# Altium footprint library Water Tank Telemeter.PcbLib: 45 footprints (part 3 of 3)
Each footprint in its own frame and in the unit in brackets; x right, y up, seen from the top. Pads: shape width x height; smd on the part's side, far side on the other; paste and mask are expansions set on the pad; w line width, h text height; cw(c..) or ccw(c..) is an arc to the next point about the centre after c.
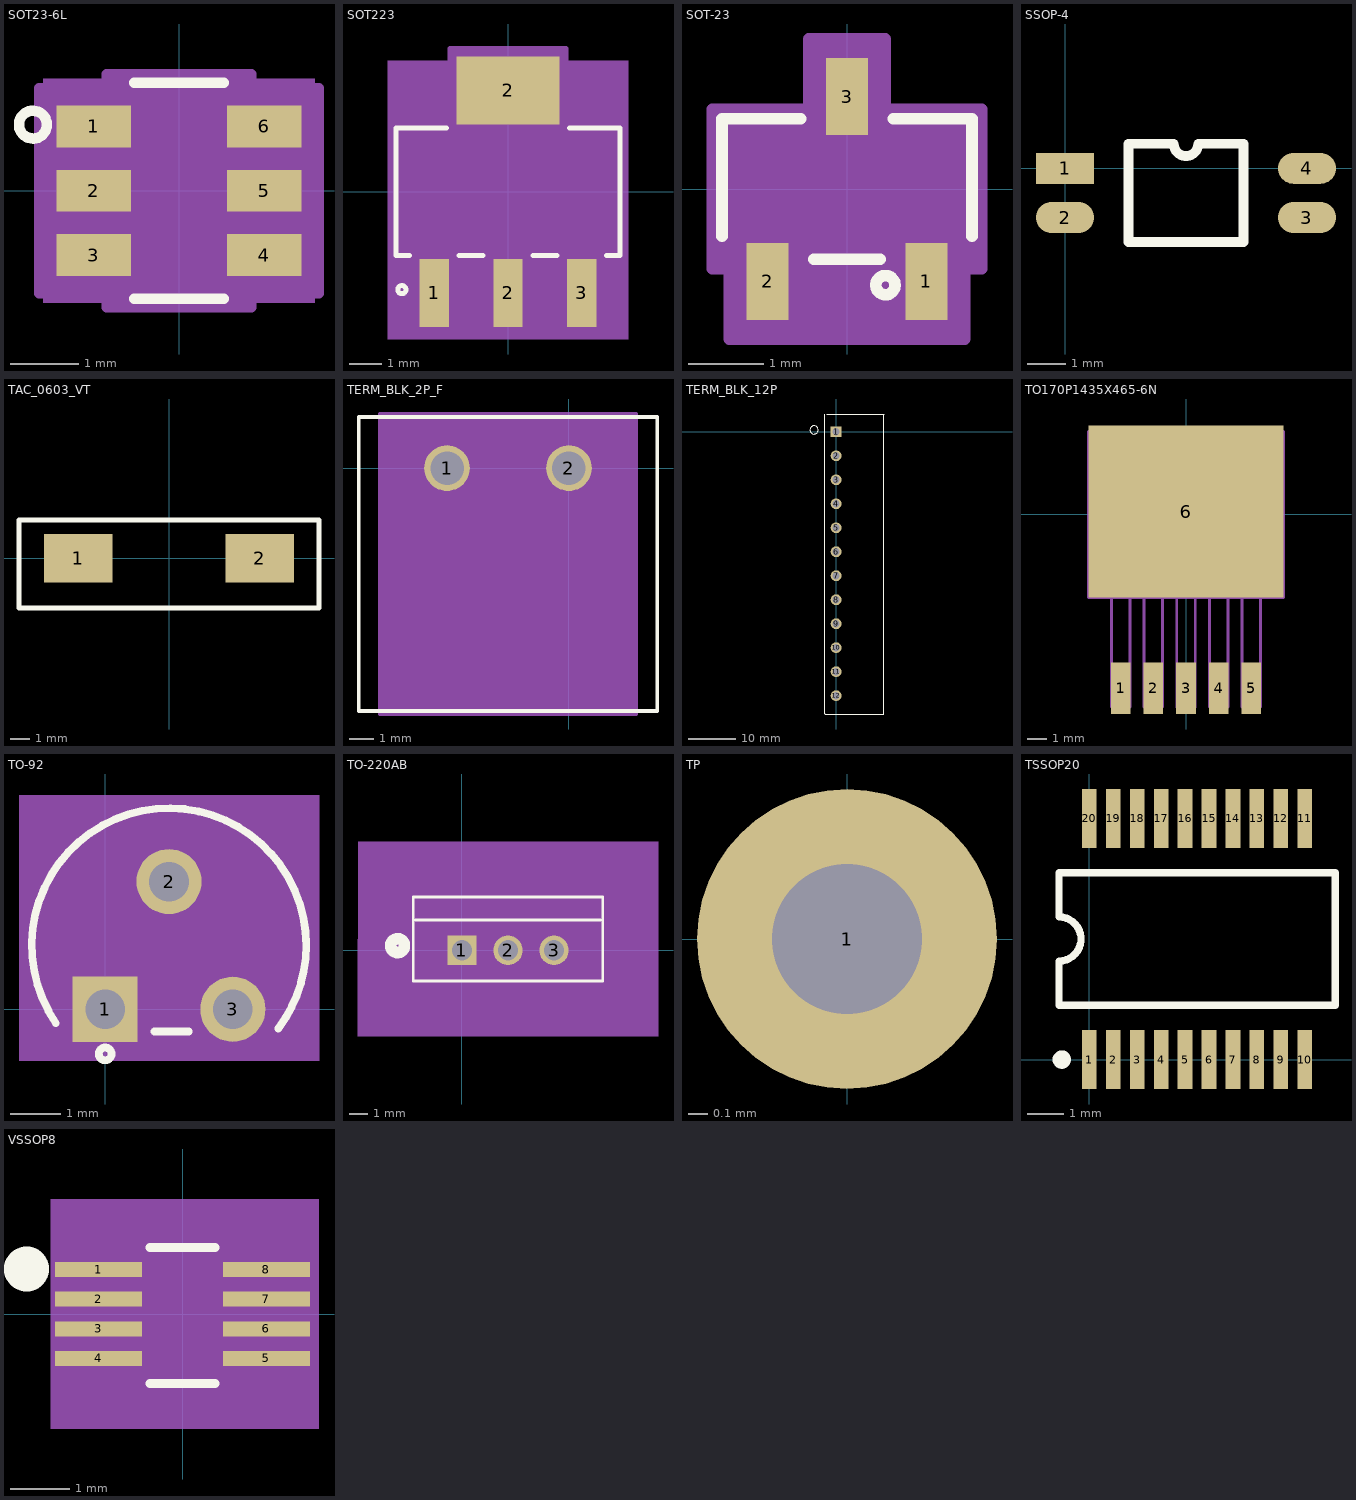
[diagram p2: the footprints below, top view; thin cyan lines are the x and y axes]

## SOT23-6L [mil]
pads (6):
  rect 43x24 smd paste+0 mask+0: 1(-49,37) 2(-49,0) 3(-49,-37) 4(49,-37) 5(49,0) 6(49,37)
Top Overlay:
  circle w6: c-84,38 r8
  lines w6: -25.88,-62 25.88,-62 ; -25.88,62 25.88,62
Mechanical 5:
  region: 78,-64.5 -78,-64.5 -78,64.5 78,64.5
Mechanical 13:
  circle w0: c-21.5,37 r3
  lines w0: -12,57 ccw(c0,57) 12,57
  lines w1: -31.5,-57 31.5,-57 31.5,57 -31.5,57 -31.5,-57
Mechanical 15:
  region: -41.5,-59 -80.5,-59 -80.5,59 -41.5,59 -41.5,67 41.5,67 41.5,59 80.5,59 80.5,-59 41.5,-59 41.5,-67 -41.5,-67
  lines w6: -80.5,-59 -80.5,59 -41.5,59 -41.5,67 41.5,67 41.5,59 80.5,59 80.5,-59 41.5,-59 41.5,-67 -41.5,-67 -41.5,-59 -80.5,-59
3D body "SOT-6_S-M.step": height 39.09, standoff 0, extent -52,-57.01 58,57.01
3D body: height 10, standoff 0, extent 0,0 10,10

## SOT223 [mil]
pads (4):
  rect 36x83 smd paste+0 mask+0: 1(-90.55,-124) 2(0,-124) 3(90.55,-124)
  rect 126x83 smd paste+0 mask+0: 2(0,124)
Top Overlay:
  circle w6: c-130,-120 r5
  lines w6: -120.85,-78 -137,-78 -137,78 -75.3,78 ; -60.25,-78 -30.3,-78 ; 30.3,-78 60.25,-78 ; 75.3,78 137,78 137,-78 120.85,-78
Mechanical 5:
  region: -147,160.5 147,160.5 147,-180.5 -147,-180.5
Mechanical 13:
  circle w0: c-122,-63 r5
  lines w1: -132,-73 -132,73 132,73 132,-73 -132,-73 ; -106.55,-143.5 -74.55,-143.5 -74.55,-73 -106.55,-73 -106.55,-143.5 ; -61,73 -61,143.5 61,143.5 61,73 -61,73 ; -16,-143.5 16,-143.5 16,-73 -16,-73 -16,-143.5 ; 74.55,-143.5 106.55,-143.5 106.55,-73 74.55,-73 74.55,-143.5
Mechanical 15:
  region: -142,-83 -142,83 -71,83 -71,175.5 71,175.5 71,83 142,83 142,-83 116.55,-83 116.55,-175.5 -116.55,-175.5 -116.55,-83
  lines w6: -142,-83 -116.55,-83 -116.55,-175.5 116.55,-175.5 116.55,-83 142,-83 142,83 71,83 71,175.5 -71,175.5 -71,83 -142,83 -142,-83
3D body "CircuitWorks-SOT-223.STEP": height 65.43, standoff -0.71, extent -127.95,-132.01 127.95,142
3D body: height 10, standoff 0, extent 0,0 10,10

## SOT-23 [mil]
pads (3):
  rect 22x40 smd paste+0 mask+0: 1(41.34,-48) 2(-41.34,-48) 3(0,48)
Top Overlay:
  circle w6: c20,-50 r5
  lines w6: -65,-24.64 -65,36.5 -24.1,36.5 ; -17.24,-36.5 17.24,-36.5 ; 24.1,36.5 65,36.5 65,-24.64
Mechanical 13:
  circle w0: c-50,-21.5 r5
  lines w1: -60,-31.5 60,-31.5 60,31.5 -60,31.5 -60,-31.5 ; -51.34,-54 -51.34,-31.5 -31.34,-31.5 -31.34,-54 -51.34,-54 ; -10,31.5 10,31.5 10,54 -10,54 -10,31.5 ; 31.34,-54 31.34,-31.5 51.34,-31.5 51.34,-54 31.34,-54
Mechanical 15:
  region: -70,-41.5 -70,41.5 -20,41.5 -20,78 20,78 20,41.5 70,41.5 70,-41.5 61.34,-41.5 61.34,-78 -61.34,-78 -61.34,-41.5
  region: 60,-31.5 -60,-31.5 -60,31.5 60,31.5
  lines w6: -70,-41.5 -70,41.5 -20,41.5 -20,78 20,78 20,41.5 70,41.5 70,-41.5 61.34,-41.5 61.34,-78 -61.34,-78 -61.34,-41.5 -70,-41.5
3D body "SOT-23_J.stp": height 39.53, standoff -0.83, extent -58.07,-48.91 58.07,48.91
3D body: height 10, standoff 0, extent 0,0 10,10

## SSOP-4 [mm]
pads (4):
  rect 1.5x0.8 smd: 1(0,0)
  oval 1.5x0.8 smd: 2(0,-1.27) 3(6.25,-1.27) 4(6.25,0)
Top Overlay:
  lines w0.254: 1.639,-1.905 4.611,-1.905 4.611,0.635 3.443,0.635 cw(c3.125,0.635) 2.808,0.635 1.639,0.635 1.639,-1.905
3D body "User Library-SSOP-4.STEP": height 2.02, standoff 0, extent -0.452,-2.032 6.548,0.668

## TAC_0603_VT [mm]
pads (2):
  rect 3.5x2.5 smd: 1(-4.625,0) 2(4.625,0)
Top Overlay:
  lines w0.254: -7.665,-2.54 7.665,-2.54 7.665,1.956 -7.665,1.956 -7.665,0 -7.665,-2.54
3D body "PTS636SK43SMTRLFS.stp": height 4.3, standoff -0.03, extent -4.325,-1.75 4.275,1.75

## TERM_BLK_2P_F [mil]
pads (2):
  round 75 hole 55 mask+0: 1(-200,0) 2(0,0)
Top Overlay:
  lines w6: -345,-398.26 145,-398.26 145,83.74 -345,83.74 -345,-398.26
Mechanical 13:
  lines w1: -300,-393.26 100,-393.26 100,78.74 -300,78.74 -300,-393.26
Mechanical 15:
  region: 110,88.74 -310,88.74 -310,-403.26 110,-403.26
  lines w6: -310,-403.26 -310,88.74 110,88.74 110,-403.26 -310,-403.26
3D body: height 10, standoff 0, extent 0,0 10,10
3D body "395326002.stp": height 330, standoff -150, extent -339,-385 140,85

## TERM_BLK_12P [mil]
pads (12):
  rect 90x90 hole 60: 1(0,0)
  round 90 hole 60: 2(0,-199.28) 3(0,-398.55) 4(0,-597.82) 5(0,-797.09) 6(0,-996.37) 7(0,-1195.64) 8(0,-1394.91) 9(0,-1594.18) 10(0,-1793.45) 11(0,-1992.73) 12(0,-2192)
Top Overlay:
  circle w10: c-183,16 r34.71
  lines w6: -96,145 -96,-2340 -92,-2344 396,-2344 396,148 399,145 -78,145
3D body "395321012.stp": height 330, standoff -150, extent -81,-2333.5 389,145.5

## TO170P1435X465-6N [mil]
pads (6):
  rect 40x106 smd: 1(-134,-356) 2(-67,-356) 3(0,-356) 4(67,-356) 5(134,-356)
  rect 400x352 smd: 6(0,6)
Mechanical 13:
  lines w6: -200,-170 -200,170 ; -200,-170 200,-170 ; -200,-170 -200,170 ; -200,-170 200,-170 ; -200,170 200,170 ; -200,170 200,170 ; -153,-395 -115,-395 ; -153,-395 -153,-170 ; -153,-395 -115,-395 ; -153,-395 -153,-170 ; -153,-170 -115,-170 ; -153,-170 -115,-170 ; -115,-395 -115,-170 ; -115,-395 -115,-170 ; -86,-395 -48,-395 ; -86,-395 -86,-170 ; -86,-395 -48,-395 ; -86,-395 -86,-170 ; -86,-170 -48,-170 ; -86,-170 -48,-170 ; -48,-395 -48,-170 ; -48,-395 -48,-170 ; -19,-395 19,-395 ; -19,-395 -19,-170 ; -19,-395 19,-395 ; -19,-395 -19,-170 ; -19,-170 19,-170 ; -19,-170 19,-170 ; 19,-395 19,-170 ; 19,-395 19,-170 ; 48,-395 86,-395 ; 48,-395 48,-170 ; 48,-395 86,-395 ; 48,-395 48,-170 ; 48,-170 86,-170 ; 48,-170 86,-170 ; 86,-395 86,-170 ; 86,-395 86,-170 ; 115,-395 153,-395 ; 115,-395 115,-170 ; 115,-395 153,-395 ; 115,-395 115,-170 ; 115,-170 153,-170 ; 115,-170 153,-170 ; 153,-395 153,-170 ; 153,-395 153,-170 ; 200,-170 200,170 ; 200,-170 200,170
3D body "LM2596SX-12--3DModel-STEP-56544.STEP": height 184, standoff -5, extent -199.99,-355 200.01,210

## TO-92 [mil]
pads (3):
  rect 51x51 hole 31 mask+0: 1(0,0)
  round 51 hole 31 mask+0: 2(50,100) 3(100,0)
Top Overlay:
  circle w6: c0,-35 r5
  lines w6: -38.6,-10.88 cw(c50,50) 157.5,50 cw(c50,50) 135.49,-15.17 ; 38.6,-17.5 65.59,-17.5
Mechanical 5:
  region: -67.5,167.5 167.5,167.5 167.5,-40.5 -67.5,-40.5
Mechanical 13:
  circle w0: c-42.5,0 r5
  lines w0: -31.24,-12.5 cw(c50,50) 131.24,-12.5
  lines w1: -31.24,-12.5 131.24,-12.5
  lines w6: -10,0 10,0 ; 0,-10 0,10
Mechanical 15:
  region: 162.5,-35.5 -62.5,-35.5 -62.5,162.5 162.5,162.5
  lines w6: -62.5,-35.5 162.5,-35.5 162.5,162.5 -62.5,162.5 -62.5,-35.5
3D body: height 10, standoff 0, extent 0,0 10,10
3D body "User Library-TO-92_CB254.STEP": height 369.65, standoff -122.48, extent -45,-50.91 151.85,110.91

## TO-220AB [mil]
pads (3):
  rect 64x64 hole 44 mask+0: 1(0,0)
  round 64 hole 44 mask+0: 2(100,0) 3(200,0)
Top Overlay:
  circle w25: c-140,10 r15
  lines w6: -101,66 301,66 ; -106,-67 -106,116 306,116 306,-67 -106,-67
Mechanical 5:
  region: -226,236 426,236 426,-187 -226,-187
Mechanical 7:
  lines w1: -166,-62 -101,-62 ; -166,111 -101,111 -101,176 ; -50,-112 0,-112 ; 0,-127 0,0 ; 100,-127 100,0 ; 150,-112 100,-112 ; 200,0 366,0 ; 200,111 366,111 ; 301,111 301,176 ; 351,50 351,0 ; 351,161 351,111 ; -151,-62 -146,-52 -156,-52 -151,-62 ; -151,-62 -151,111 ; -151,111 -146,101 -156,101 -151,111 ; -101,161 -91,156 -91,166 -101,161 ; -101,161 301,161 ; 0,-112 -10,-117 -10,-107 0,-112 ; 100,-112 110,-117 110,-107 100,-112 ; 100,0 366,0 ; 100,0 366,0 ; 301,161 291,156 291,166 301,161 ; 346,-10 356,-10 ; 346,-10 351,0 ; 346,-10 356,-10 ; 346,-10 351,0 ; 351,0 356,-10 ; 351,0 356,10 346,10 351,0 ; 351,0 351,-50 351,0 ; 351,0 356,-10 ; 351,111 356,121 346,121 351,111
  text "0.402in/10.211mm" at 0,181 h25
  text "0.1in/2.54mm" at -25,-157 h25
Mechanical 13:
  circle w0: c-91,-52 r8
  lines w1: -101,61 301,61 ; -101,-62 -101,111 301,111 301,-62 -101,-62
  text "TAB" at 81.25,73.5 h25
Mechanical 15:
  region: 311,121 -111,121 -111,-72 311,-72
  lines w6: -111,-72 311,-72 311,121 -111,121 -111,-72
3D body: height 10, standoff 0, extent 0,0 10,10
3D body "User Library-IRF540N Transistors MOSFET N-Channel TO-220AB.STEP": height 804.92, standoff -489.96, extent -100,-55 300,110.56

## TP [mil]
pads (1):
  round 60 hole 30: 1(0,0)

## TSSOP20 [mm]
pads (20):
  rect 0.4x1.6 smd: 1(0,0) 2(0.65,0) 3(1.3,0) 4(1.95,0) 5(2.6,0) 6(3.25,0) 7(3.9,0) 8(4.55,0) 9(5.2,0) 10(5.85,0) 11(5.85,6.55) 12(5.2,6.55) 13(4.55,6.55) 14(3.9,6.55) 15(3.25,6.55) 16(2.6,6.55) 17(1.95,6.55) 18(1.3,6.55) 19(0.65,6.55) 20(0,6.55)
Top Overlay:
  circle w0.25: c-0.75,0 r0.125
  lines w0.2: -0.825,1.475 6.675,1.475 6.675,5.075 -0.825,5.075 -0.825,3.875 cw(c-0.825,3.275) -0.825,2.675 -0.825,1.475
3D body "User Library-TSSOP-20.STEP": height 1.2, standoff 0, extent -0.379,0.027 6.221,6.577

## VSSOP8 [mil]
pads (8):
  rect 58x10 smd paste+0 mask+0: 1(-56,29.53) 2(-56,9.84) 3(-56,-9.84) 4(-56,-29.53) 5(56,-29.53) 6(56,-9.84) 7(56,9.84) 8(56,29.53)
Top Overlay:
  circle w20: c-104,30 r5
  lines w6: -21.68,-46.5 21.68,-46.5 ; -21.68,44.5 21.68,44.5
Mechanical 5:
  region: 91,-76.5 -88,-76.5 -88,76.5 91,76.5
Mechanical 13:
  lines w0: -12,41.5 ccw(c0,41.5) 12,41.5
  lines w1: -63,-34.53 -47,-34.53 -47,-24.53 -63,-24.53 -63,-34.53 ; -63,-14.84 -47,-14.84 -47,-4.84 -63,-4.84 -63,-14.84 ; -63,4.84 -47,4.84 -47,14.84 -63,14.84 -63,4.84 ; -63,24.53 -47,24.53 -47,34.53 -63,34.53 -63,24.53 ; -47,-41.5 -47,41.5 47,41.5 47,-41.5 -47,-41.5 ; 47,-34.53 63,-34.53 63,-24.53 47,-24.53 47,-34.53 ; 47,-14.84 63,-14.84 63,-4.84 47,-4.84 47,-14.84 ; 47,4.84 63,4.84 63,14.84 47,14.84 47,4.84 ; 47,24.53 63,24.53 63,34.53 47,34.53 47,24.53
  text "*" at -44.5,-11.5 h50
Mechanical 15:
  region: -67,-54.53 -88,-54.53 -88,54.53 -67,54.53 -67,61.5 67,61.5 67,54.53 91,54.53 91,-54.53 67,-54.53 67,-61.5 -67,-61.5
  lines w6: -85,-54.53 -67,-54.53 -67,-61.5 67,-61.5 67,-54.53 88,-54.53 88,54.53 67,54.53 67,61.5 -67,61.5 -67,54.53 -85,54.53 -85,-54.53
3D body: height 10, standoff 0, extent 0,0 10,10
3D body "User Library-SOP50P310X90-8N[8US8_VSSOP_DCU_MO-187CA].STEP": height 35.43, standoff 0, extent -63.99,-41.34 62,41.34